# Altium schematic symbol library ESP32-S31 CB V1.1.SCHLIB: 31 symbols
Pins are listed as number, name and electrical type; pins without a type are passive.

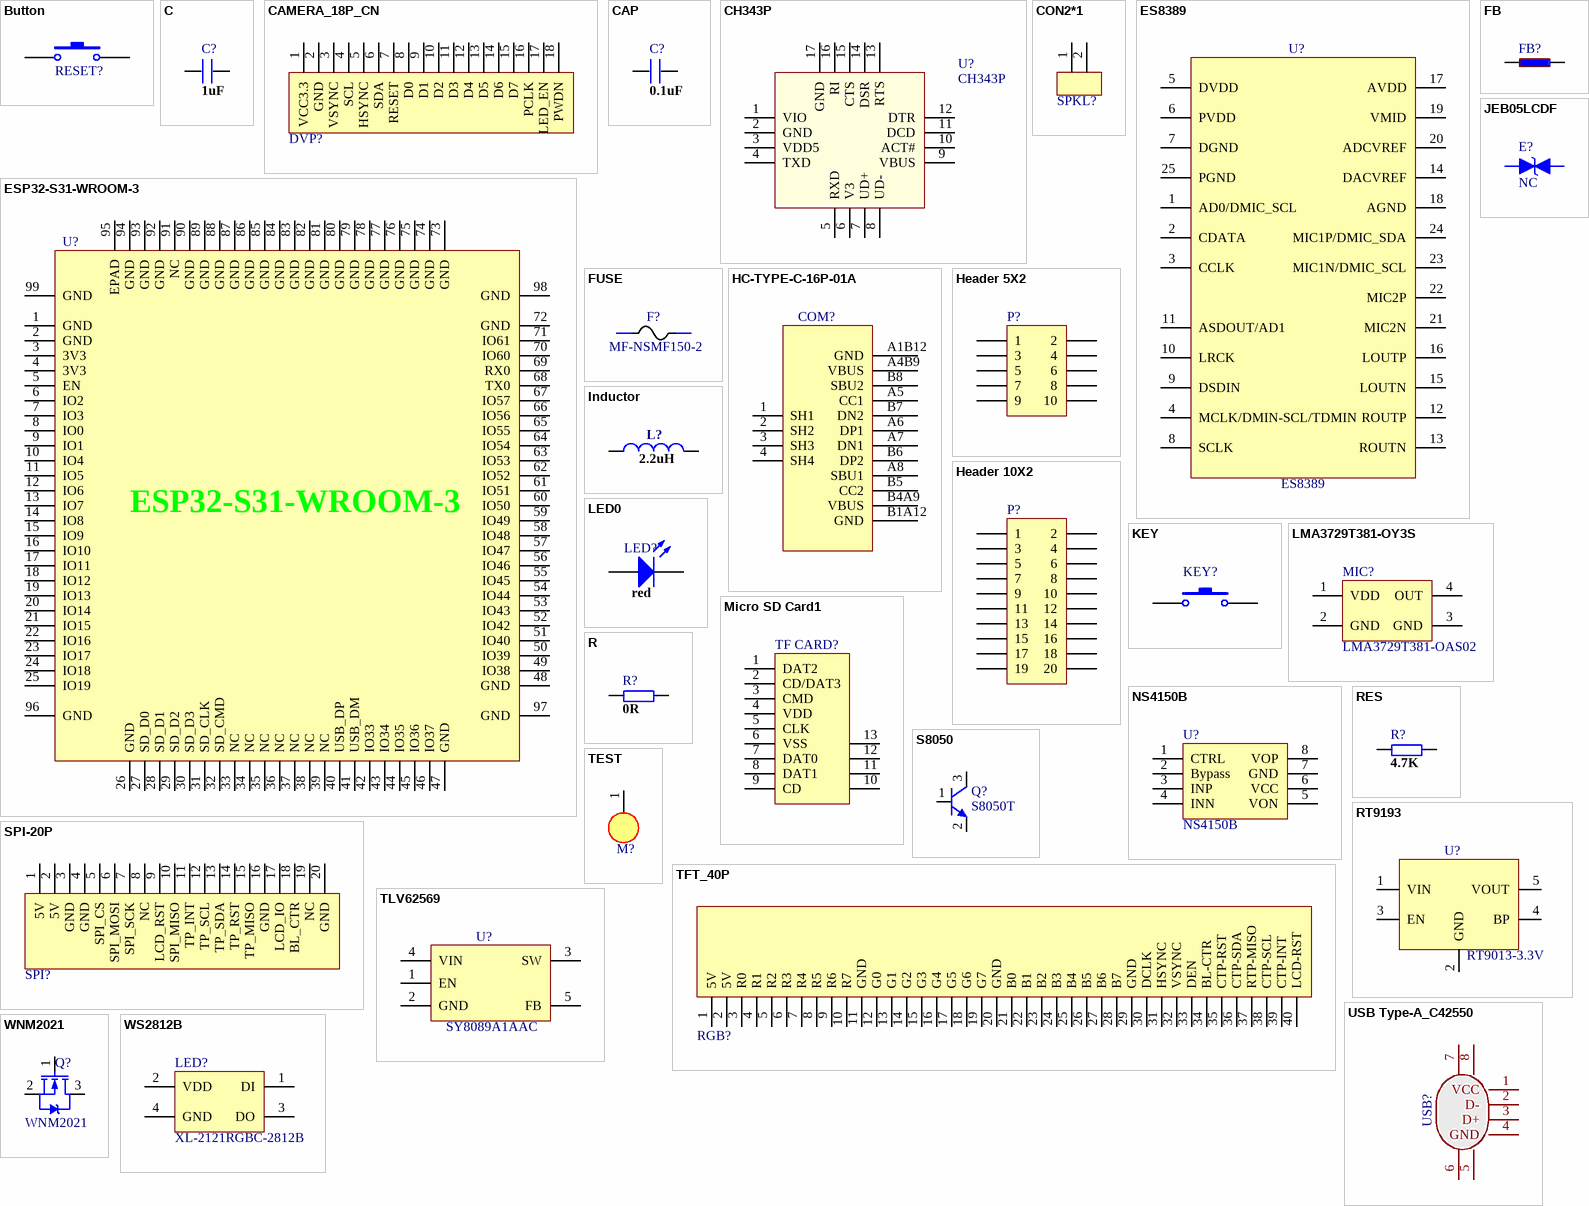
[diagram p0: symbols Button to WS2812B]

## Button
designator RESET?
footprint KEY_M
footprint TSW SMD-3*4*2.5
pins: 1, 2

## C
designator C?, comment 1uF
footprint 0603P
footprint 0805
footprint 0402P
pins: 1, 2

## CAMERA_18P_CN
designator DVP?
footprint 0.5K-DX-18PWB
pins: 1 VCC3.3, 2 GND, 3 VSYNC, 4 SCL, 5 HSYNC, 6 SDA, 7 RESET, 8 D0, 9 D1, 10 D2, 11 D3, 12 D4, 13 D5, 14 D6, 15 D7, 16 PCLK, 17 LED_EN, 18 PWDN

## CAP
designator C?, comment 0.1uF
footprint 0603P
footprint 0805
footprint 0402P
pins: 1, 2

## CH343P
designator U?
footprint QFN16
pins: 1 VIO, 2 GND, 3 VDD5, 4 TXD, 5 RXD, 6 V3, 7 UD+, 8 UD-, 9 VBUS, 10 ACT#, 11 DCD, 12 DTR, 13 RTS, 14 DSR, 15 CTS, 16 RI, 17 GND

## CON2*1
designator SPKL?
footprint SMD-2P-P1.25
pins: 1, 2

## ES8389
designator U?
footprint QFN-24
pins: 1 AD0/DMIC_SCL, 2 CDATA, 3 CCLK, 4 MCLK/DMIN-SCL/TDMIN, 5 DVDD, 6 PVDD, 7 DGND, 8 SCLK, 9 DSDIN, 10 LRCK, 11 ASDOUT/AD1, 12 ROUTP, 13 ROUTN, 14 DACVREF, 15 LOUTN, 16 LOUTP, 17 AVDD, 18 AGND, 19 VMID, 20 ADCVREF, 21 MIC2N, 22 MIC2P, 23 MIC1N/DMIC_SCL, 24 MIC1P/DMIC_SDA, 25 PGND

## ESP32-S31-WROOM-3
designator U?
footprint ESP32-S31-WROOM-3
pins: 1 GND, 2 GND, 3 3V3, 4 3V3, 5 EN, 6 IO2, 7 IO3, 8 IO0, 9 IO1, 10 IO4, 11 IO5, 12 IO6, 13 IO7, 14 IO8, 15 IO9, 16 IO10, 17 IO11, 18 IO12, 19 IO13, 20 IO14, 21 IO15, 22 IO16, 23 IO17, 24 IO18, 25 IO19, 26 GND, 27 SD_D0, 28 SD_D1, 29 SD_D2, 30 SD_D3, 31 SD_CLK, 32 SD_CMD, 33 NC, 34 NC, 35 NC, 36 NC, 37 NC, 38 NC, 39 NC, 40 USB_DP, 41 USB_DM, 42 IO33, 43 IO34, 44 IO35, 45 IO36, 46 IO37, 47 GND, 48 GND, 49 IO38, 50 IO39, 51 IO40, 52 IO42, 53 IO43, 54 IO44, 55 IO45, 56 IO46, 57 IO47, 58 IO48, 59 IO49, 60 IO50, 61 IO51, 62 IO52, 63 IO53, 64 IO54, 65 IO55, 66 IO56, 67 IO57, 68 TX0, 69 RX0, 70 IO60, 71 IO61, 72 GND, 73 GND, 74 GND, 75 GND, 76 GND, 77 GND, 78 GND, 79 GND, 80 GND, 81 GND, 82 GND, 83 GND, 84 GND, 85 GND, 86 GND, 87 GND, 88 GND, 89 GND, 90 GND, 91 NC, 92 GND, 93 GND, 94 GND, 95 EPAD, 96 GND, 97 GND, 98 GND, 99 GND

## FB
designator FB?
footprint 0603P
footprint 0805P
footprint 0603P
pins: 1, 2

## FUSE
designator F?, comment MF-NSMF150-2
footprint 0805P
footprint 1206P
pins: 1, 2

## HC-TYPE-C-16P-01A
designator COM?
footprint TYPE-C-31-M-12
footprint TYPE-C-31-M-12-1
pins: 1 SH1, 2 SH2, 3 SH3, 4 SH4, A1B12 GND, A4B9 VBUS, A5 CC1, A6 DP1, A7 DN1, A8 SBU1, B1A12 GND, B4A9 VBUS, B5 CC2, B6 DP2, B7 DN2, B8 SBU2

## Header 5X2
designator P?
Header, 5-Pin, Dual row; LatestRevisionDate: 17-Jul-2002; LatestRevisionNote: Re-released for DXP Platform.; Publisher: Altium Limited
footprint HDR2X5 (Connector; Header; 5x2 Position)
signal-integrity model Connector
footprint HEADER5*2
pins: 1, 2, 3, 4, 5, 6, 7, 8, 9, 10

## Header 10X2
designator P?
Header, 10-Pin, Dual row; LatestRevisionDate: 17-Jul-2002; LatestRevisionNote: Re-released for DXP Platform.; Publisher: Altium Limited
footprint HDR2X10 (Connector; Header; 10x2 Position)
signal-integrity model Connector
footprint HEADER10*2
pins: 1, 2, 3, 4, 5, 6, 7, 8, 9, 10, 11, 12, 13, 14, 15, 16, 17, 18, 19, 20

## Inductor
designator L?, comment 2.2uH
Inductor; Code_IEC: 1005; Value: 10uH; Published: 8-Jun-2000; LatestRevisionDate: 17-Jul-2002; LatestRevisionNote: Re-released for DXP Platform.; PackageReference: 0402-A; Publisher: Altium Limited; Code_JEITA: 0402
footprint 0402-A (Chip Inductor; Body 1 x 0.5 mm (LxW typ))
footprint L0603 (Chip Inductor; Body 1.6 x 0.8 mm (LxW typ))
footprint 2012_Chip (2012 Chip; Chip Inductor; Body 2.0 x 1.2 mm (LxW typ))
footprint 2029 (Chip Inductor; Body 2 x 1.2 mm (LxW typ))
footprint 3261 (3216 Chip; Chip Inductor; Body 3.2 x 1.6 mm (LxW typ))
footprint 4564_Chip (4564 Chip; Chip Inductor; Body 4.5 x 6.4 mm (LxW typ))
simulation model INDUCTOR (Inductor)
signal-integrity model Inductor
footprint CD43
footprint NR6020
footprint 0420-4R7
pins: 1, 2

## JEB05LCDF
designator E?, comment NC
footprint DFN1006-2L-BI
pins: 1, 2

## KEY
designator KEY?
footprint KEY_M
footprint TSW SMD-3*4*2.5
pins: 1, 2

## LED0
designator LED?, comment red
Typical INFRARED GaAs LED; Published: 8-Jun-2000; LatestRevisionDate: 08-Jul-2005; LatestRevisionNote: Mech Layer 1 removed.; PackageReference: LED-0; Publisher: Altium Limited
footprint LED-0 (Typical INFRARED GaAs LED; 2 Leads)
simulation model LED0 (Diode)
footprint SMDLED
footprint LED0603
pins: 1 A, 2 K

## LMA3729T381-OY3S
designator MIC?, comment LMA3729T381-OAS02
footprint MIC-SMD-4P
footprint MIC-SMD-4P
pins: 1 VDD, 2 GND, 3 GND, 4 OUT

## Micro SD Card1
designator TF CARD?
footprint TF Card
pins: 1 DAT2, 2 CD/DAT3, 3 CMD, 4 VDD, 5 CLK, 6 VSS, 7 DAT0, 8 DAT1, 9 CD, 10, 11, 12, 13

## NS4150B
designator U?
footprint MSOP8
pins: 1 CTRL, 2 Bypass, 3 INP, 4 INN, 5 VON, 6 VCC, 7 GND, 8 VOP

## R
designator R?, comment 0R
footprint 0805
footprint 0603P
footprint 0402P
footprint 0402P
pins: 1, 2

## RES
designator R?, comment 4.7K
footprint 0805
footprint 0603P
footprint 0402P
footprint 0603P
pins: 1, 2

## RT9193
designator U?, comment RT9013-3.3V
footprint SOT-23-5
pins: 1 VIN, 2 GND, 3 EN, 4 BP, 5 VOUT

## S8050
designator Q?, comment S8050T
footprint SOT-523
pins: 1 B, 2 E, 3 C

## SPI-20P
designator SPI?
footprint FH12-20S-0.5SH
pins: 1 5V, 2 5V, 3 GND, 4 GND, 5 SPI_CS, 6 SPI_MOSI, 7 SPI_SCK, 8 NC, 9 LCD_RST, 10 SPI_MISO, 11 TP_INT, 12 TP_SCL, 13 TP_SDA, 14 TP_RST, 15 TP_MISO, 16 GND, 17 LCD_IO, 18 BL_CTR, 19 NC, 20 GND

## TEST
designator M?
footprint SMTSO-M2.5-6ET
footprint SMTSO-M2.5-6ET-1
footprint M3-5.4mm
footprint M3-5.3mm
footprint M3.1-5.3
pins: 1

## TFT_40P
designator RGB?  (value not drawn)
footprint 0.5K-DX-40PWB-1
pins: 1 5V, 2 5V, 3 R0, 4 R1, 5 R2, 6 R3, 7 R4, 8 R5, 9 R6, 10 R7, 11 GND, 12 G0, 13 G1, 14 G2, 15 G3, 16 G4, 17 G5, 18 G6, 19 G7, 20 GND, 21 B0, 22 B1, 23 B2, 24 B3, 25 B4, 26 B5, 27 B6, 28 B7, 29 GND, 30 DCLK, 31 HSYNC, 32 VSYNC, 33 DEN, 34 BL-CTR, 35 CTP-RST, 36 CTP-SDA, 37 RTP-MISO, 38 CTP-SCL, 39 CTP-INT, 40 LCD-RST

## TLV62569
designator U?, comment SY8089A1AAC
footprint SOT-23-5_L3.0-W1.7-P0.95-LS2.8-BR
pins: 1 EN, 2 GND, 3 SW, 4 VIN, 5 FB

## USB Type-A_C42550
designator USB?
footprint USB Type-A
footprint USB-A-SMD
footprint USB-A-SMD_AF-10.0-QT-ZB6.8
footprint USB-A-SMD_AF-10.0-QT-ZB6.8
pins: 1 VCC, 2 D-, 3 D+, 4 GND, 5, 6, 7, 8

## WNM2021
designator Q?
footprint WNM2021
pins: 1 G, 2 S, 3 D

## WS2812B
designator LED?, comment XL-2121RGBC-2812B
footprint LED-SMD-4P-2121
pins: 1 DI, 2 VDD, 3 DO, 4 GND